# Altium footprint library Cole_.PcbLib: 167 footprints (part 2 of 11)
Each footprint in its own frame and in the unit in brackets; x right, y up, seen from the top. Pads: shape width x height; smd on the part's side, far side on the other; paste and mask are expansions set on the pad; w line width, h text height; cw(c..) or ccw(c..) is an arc to the next point about the centre after c.
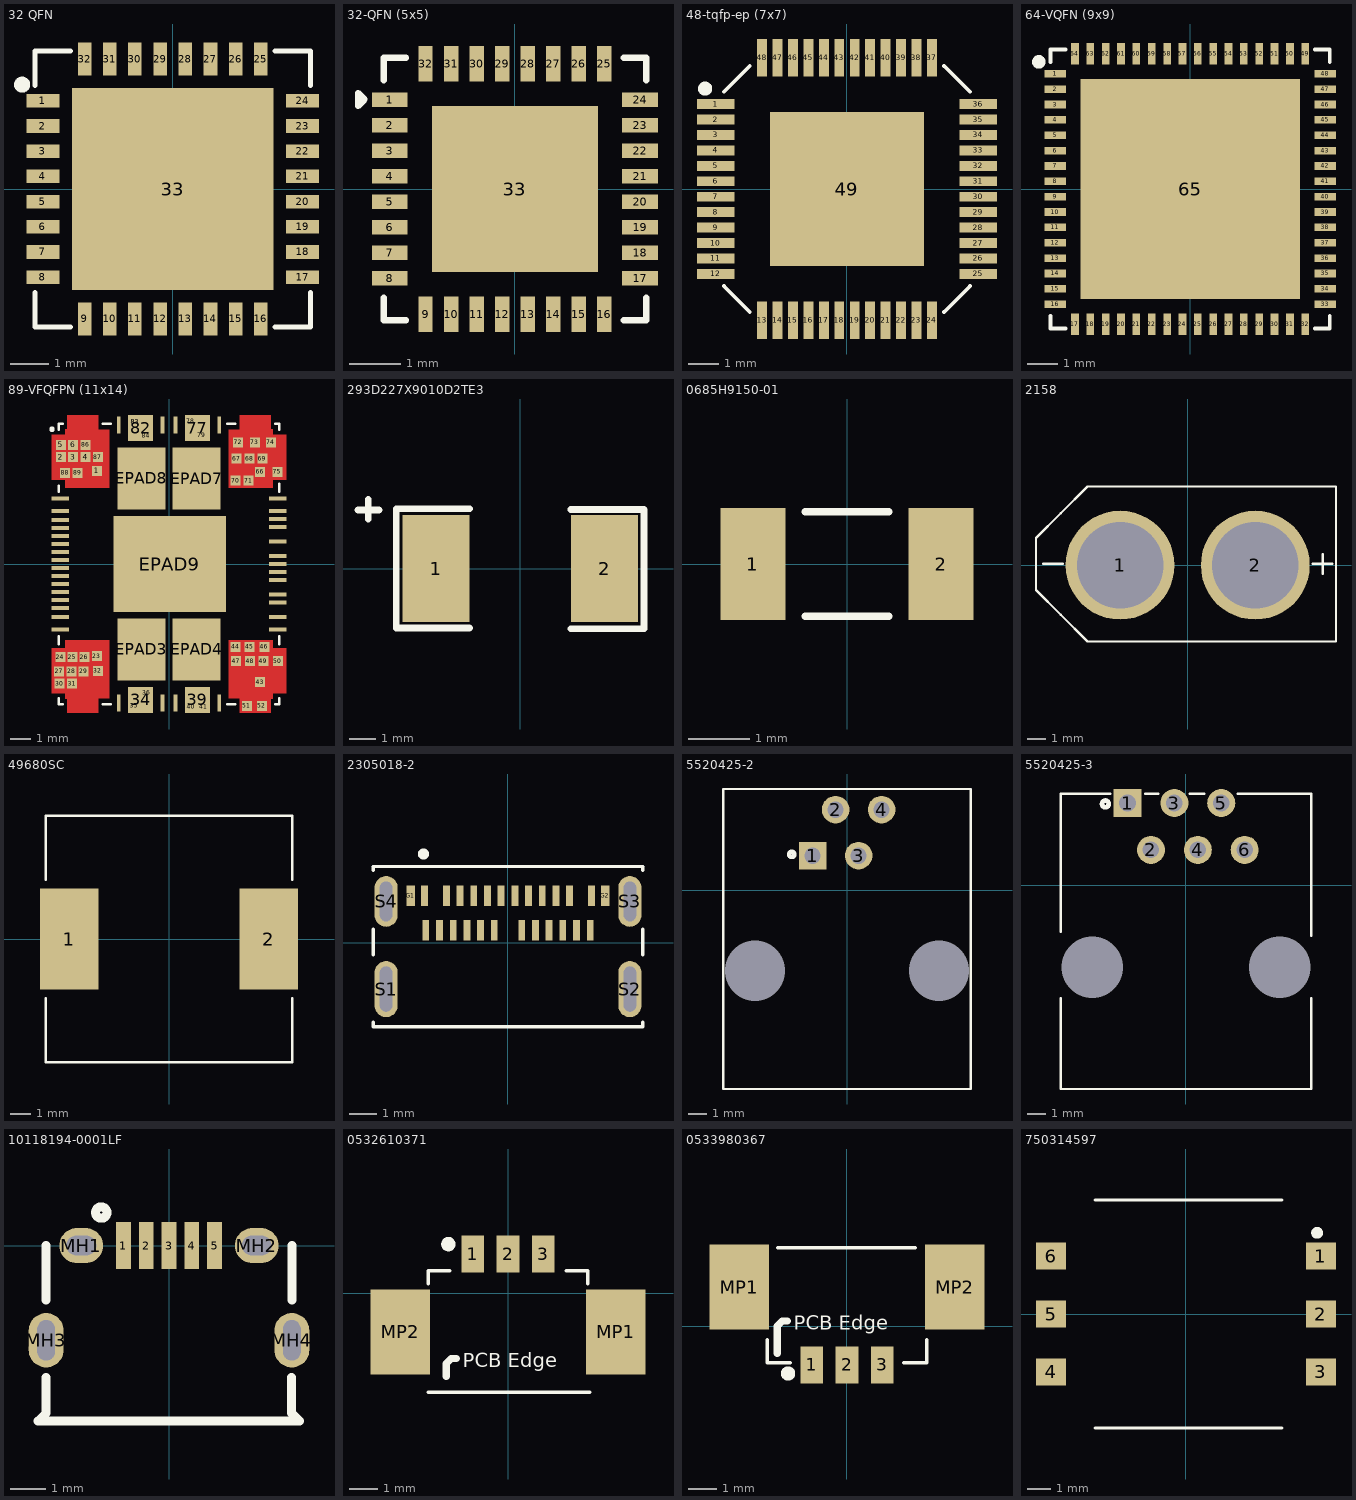
[diagram p1: the footprints below, top view; thin cyan lines are the x and y axes]

## 32 QFN [mm] "32pins, 5x5mm body, 0.5mm pitch QFN package"
pads (33):
  rect 0.85x0.35 smd: 1(-3.35,2.275) 2(-3.35,1.625) 3(-3.35,0.975) 4(-3.35,0.325) 5(-3.35,-0.325) 6(-3.35,-0.975) 7(-3.35,-1.625) 8(-3.35,-2.275) 17(3.35,-2.275) 18(3.35,-1.625) 19(3.35,-0.975) 20(3.35,-0.325) 21(3.35,0.325) 22(3.35,0.975) 23(3.35,1.625) 24(3.35,2.275)
  rect 0.35x0.85 smd: 9(-2.275,-3.35) 10(-1.625,-3.35) 11(-0.975,-3.35) 12(-0.325,-3.35) 13(0.325,-3.35) 14(0.975,-3.35) 15(1.625,-3.35) 16(2.275,-3.35) 25(2.275,3.35) 26(1.625,3.35) 27(0.975,3.35) 28(0.325,3.35) 29(-0.325,3.35) 30(-0.975,3.35) 31(-1.625,3.35) 32(-2.275,3.35)
  rect 5.2x5.2 smd: 33(0,0)
Top Overlay:
  circle w0.254: c-3.886,2.692 r0.08
  lines w0.127: -3.556,-2.667 -3.556,-3.556 -2.642,-3.556 ; -3.556,2.667 -3.556,3.556 -2.642,3.556 ; 2.642,-3.556 3.556,-3.556 3.556,-2.667 ; 2.642,3.556 3.556,3.556 3.556,2.667
3D body "User Library-QFN-32-7x7 - EQ-1.step": height 0.85, standoff 0, extent -3.5,-3.5 3.5,3.5

## 32-QFN (5x5) [mm] "32pins, 5x5mm body, 0.5mm pitch QFN package"
pads (33):
  rect 0.7x0.28 smd: 1(-2.45,1.75) 2(-2.45,1.25) 3(-2.45,0.75) 4(-2.45,0.25) 5(-2.45,-0.25) 6(-2.45,-0.75) 7(-2.45,-1.25) 8(-2.45,-1.75) 17(2.45,-1.75) 18(2.45,-1.25) 19(2.45,-0.75) 20(2.45,-0.25) 21(2.45,0.25) 22(2.45,0.75) 23(2.45,1.25) 24(2.45,1.75)
  rect 0.28x0.7 smd: 9(-1.75,-2.45) 10(-1.25,-2.45) 11(-0.75,-2.45) 12(-0.25,-2.45) 13(0.25,-2.45) 14(0.75,-2.45) 15(1.25,-2.45) 16(1.75,-2.45) 25(1.75,2.45) 26(1.25,2.45) 27(0.75,2.45) 28(0.25,2.45) 29(-0.25,2.45) 30(-0.75,2.45) 31(-1.25,2.45) 32(-1.75,2.45)
  rect 3.254x3.254 smd: 33(0,0)
Top Overlay:
  lines w0.127: -2.565,-2.134 -2.565,-2.565 -2.134,-2.565 ; -2.565,2.134 -2.565,2.565 -2.134,2.565 ; 2.134,-2.565 2.565,-2.565 2.565,-2.134 ; 2.134,2.565 2.565,2.565 2.565,2.134 ; -3.073,1.626 -2.946,1.753 -3.073,1.88 -3.073,1.626
3D body "User Library-QFN-32-5x5 - EQ.STEP": height 0.85, standoff 0, extent -2.5,-2.5 2.5,2.5

## 48-tqfp-ep (7x7) [mm]
pads (49):
  rect 1.22x0.32 smd: 1(-4.25,2.75) 2(-4.25,2.25) 3(-4.25,1.75) 4(-4.25,1.25) 5(-4.25,0.75) 6(-4.25,0.25) 7(-4.25,-0.25) 8(-4.25,-0.75) 9(-4.25,-1.25) 10(-4.25,-1.75) 11(-4.25,-2.25) 12(-4.25,-2.75) 25(4.25,-2.75) 26(4.25,-2.25) 27(4.25,-1.75) 28(4.25,-1.25) 29(4.25,-0.75) 30(4.25,-0.25) 31(4.25,0.25) 32(4.25,0.75) 33(4.25,1.25) 34(4.25,1.75) 35(4.25,2.25) 36(4.25,2.75)
  rect 0.32x1.22 smd: 13(-2.75,-4.25) 14(-2.25,-4.25) 15(-1.75,-4.25) 16(-1.25,-4.25) 17(-0.75,-4.25) 18(-0.25,-4.25) 19(0.25,-4.25) 20(0.75,-4.25) 21(1.25,-4.25) 22(1.75,-4.25) 23(2.25,-4.25) 24(2.75,-4.25) 37(2.75,4.25) 38(2.25,4.25) 39(1.75,4.25) 40(1.25,4.25) 41(0.75,4.25) 42(0.25,4.25) 43(-0.25,4.25) 44(-0.75,4.25) 45(-1.25,4.25) 46(-1.75,4.25) 47(-2.25,4.25) 48(-2.75,4.25)
  rect 5x5 smd: 49(0,0)
Top Overlay:
  circle w0.254: c-4.597,3.251 r0.102
  lines w0.127: -3.988,-3.15 -3.15,-3.988 ; -3.988,3.15 -3.15,3.988 ; 3.15,-3.988 3.988,-3.15 ; 3.15,3.988 3.988,3.15
3D body "User Library-P-LQFP48-7x7-0_50.step": height 1.43, standoff -0.02, extent -4.513,-4.512 4.487,4.488

## 64-VQFN (9x9) [mm]
pads (65):
  rect 0.7x0.25 smd: 1(-4.4,3.75) 2(-4.4,3.25) 3(-4.4,2.75) 4(-4.4,2.25) 5(-4.4,1.75) 6(-4.4,1.25) 7(-4.4,0.75) 8(-4.4,0.25) 9(-4.4,-0.25) 10(-4.4,-0.75) 11(-4.4,-1.25) 12(-4.4,-1.75) 13(-4.4,-2.25) 14(-4.4,-2.75) 15(-4.4,-3.25) 16(-4.4,-3.75) 33(4.4,-3.75) 34(4.4,-3.25) 35(4.4,-2.75) 36(4.4,-2.25) 37(4.4,-1.75) 38(4.4,-1.25) 39(4.4,-0.75) 40(4.4,-0.25) 41(4.4,0.25) 42(4.4,0.75) 43(4.4,1.25) 44(4.4,1.75) 45(4.4,2.25) 46(4.4,2.75) 47(4.4,3.25) 48(4.4,3.75)
  rect 0.25x0.7 smd: 17(-3.75,-4.4) 18(-3.25,-4.4) 19(-2.75,-4.4) 20(-2.25,-4.4) 21(-1.75,-4.4) 22(-1.25,-4.4) 23(-0.75,-4.4) 24(-0.25,-4.4) 25(0.25,-4.4) 26(0.75,-4.4) 27(1.25,-4.4) 28(1.75,-4.4) 29(2.25,-4.4) 30(2.75,-4.4) 31(3.25,-4.4) 32(3.75,-4.4) 49(3.75,4.4) 50(3.25,4.4) 51(2.75,4.4) 52(2.25,4.4) 53(1.75,4.4) 54(1.25,4.4) 55(0.75,4.4) 56(0.25,4.4) 57(-0.25,4.4) 58(-0.75,4.4) 59(-1.25,4.4) 60(-1.75,4.4) 61(-2.25,4.4) 62(-2.75,4.4) 63(-3.25,4.4) 64(-3.75,4.4)
  rect 7.15x7.15 smd: 65(0,0)
Top Overlay:
  circle w0.254: c-4.928,4.14 r0.092
  lines w0.127: -4.547,-4.14 -4.547,-4.547 -4.064,-4.547 ; -4.547,4.14 -4.547,4.547 -4.064,4.547 ; 4.064,-4.547 4.547,-4.547 4.547,-4.14 ; 4.064,4.547 4.547,4.547 4.547,4.14
3D body "User Library-SiLabs QFN64 (9x9).step": height 0.9, standoff 0, extent -4.5,-4.5 4.5,4.5

## 89-VFQFPN (11x14) [mm]
pads (95):
  rect 0.5x0.5 smd paste-1 mask+0: 1(-3.6,4.65) 2(-5.404,5.334) 3(-4.785,5.334) 4(-4.166,5.334) 5(-5.404,5.953) 6(-4.785,5.953) 23(-3.6,-4.6) 24(-5.428,-4.648) 25(-4.826,-4.648) 26(-4.224,-4.648) 27(-5.486,-5.359) 28(-4.859,-5.359) 29(-4.258,-5.359) 30(-5.461,-5.969) 31(-4.834,-5.969) 32(-3.556,-5.334) 35(-1.727,-7.087) 36(-1.1,-6.426) 40(1.1,-7.137) 41(1.727,-7.137) 43(4.55,-5.9) 44(3.327,-4.14) 45(4.031,-4.14) 46(4.759,-4.14) 47(3.353,-4.851) 48(4.056,-4.851) 49(4.708,-4.851) 50(5.437,-4.851) 51(3.886,-7.087) 52(4.64,-7.087) 66(4.55,4.6) 67(3.378,5.258) 68(4.031,5.258) 69(4.658,5.258) 70(3.327,4.166) 71(3.98,4.166) 72(3.454,6.071) 73(4.285,6.071) 74(5.089,6.071) 75(5.41,4.597) 78(1.092,7.137) 79(1.643,6.426) 83(-1.676,7.112) 83(-1.676,7.112) 84(-1.143,6.401) 86(-4.166,5.953) 87(-3.547,5.334) 88(-5.182,4.547) 89(-4.563,4.547)
  rect 0.86x0.19 smd: 7(-5.435,3.27) 8(-5.435,2.65) 9(-5.435,2.2) 10(-5.435,1.8) 11(-5.435,1.4) 12(-5.435,1) 13(-5.435,0.6) 14(-5.435,0.2) 15(-5.435,-0.2) 16(-5.435,-0.6) 17(-5.435,-1) 18(-5.435,-1.4) 19(-5.435,-1.8) 20(-5.435,-2.2) 21(-5.435,-2.65) 22(-5.435,-3.27) 53(5.435,-3.27) 54(5.435,-2.65) 55(5.435,-1.93) 56(5.435,-1.53) 57(5.435,-0.8) 58(5.435,-0.4) 59(5.435,0) 60(5.435,0.4) 61(5.435,1.13) 62(5.435,1.85) 63(5.435,2.25) 64(5.435,2.65) 65(5.435,3.27)
  rect 0.19x0.86 smd: 33(-2.51,-6.935) 37(-0.32,-6.935) 38(0.32,-6.935) 42(2.51,-6.935) 76(2.51,6.935) 80(0.32,6.935) 81(-0.32,6.935) 85(-2.51,6.935)
  rect 1.26x1.3 smd paste-2: 34(-1.42,-6.79) 39(1.42,-6.79) 77(1.42,6.79) 82(-1.42,6.79)
  rect 2.4x3.1 smd paste-3: EPAD3(-1.38,-4.26) EPAD4(1.38,-4.26) EPAD7(1.38,4.26) EPAD8(-1.38,4.27)
  rect 5.6x4.8 smd paste-4: EPAD9(0.04,0)
Top Layer:
  region: -2.99,-6.71 -3.54,-6.71 -3.54,-7.44 -5.07,-7.44 -5.07,-6.72 -5.19,-6.72 -5.19,-6.45 -5.86,-6.45 -5.86,-4.2 -5.18,-4.2 -5.18,-3.81 -2.99,-3.81
  region: 5.07,6.72 5.19,6.72 5.19,6.45 5.86,6.45 5.86,4.2 5.18,4.2 5.18,3.81 2.99,3.81 2.99,6.71 3.54,6.71 3.54,7.44 5.07,7.44
  region: 5.18,-4.2 5.86,-4.2 5.86,-6.45 5.19,-6.45 5.19,-6.72 5.07,-6.72 5.07,-7.44 3.54,-7.44 3.54,-6.71 2.99,-6.71 2.99,-3.81 5.18,-3.81
  region: -3.54,6.71 -2.99,6.71 -2.99,3.81 -5.18,3.81 -5.18,4.2 -5.86,4.2 -5.86,6.45 -5.19,6.45 -5.19,6.72 -5.07,6.72 -5.07,7.44 -3.54,7.44
Top Overlay:
  circle w0.2: c-5.842,6.731 r0.033
  lines w0.127: -5.5,-6.7 -5.5,-7 -5.3,-7 ; -5.5,-4 -5.5,-3.6 ; -5.5,3.6 -5.5,3.9 ; -5.5,6.7 -5.5,7 -5.3,7 ; -3.3,-7 -2.9,-7 ; -3.3,7 -2.9,7 ; 2.9,-7 3.3,-7 ; 2.9,7 3.3,7 ; 5.3,-7 5.5,-7 5.5,-6.7 ; 5.3,7 5.5,7 5.5,6.7 ; 5.5,-4 5.5,-3.6 ; 5.5,3.6 5.5,4
Top Paste:
  drawing of 94 lines, arcs and shapes, not listed
Top Solder:
  region: -5.26,4.14 -5.94,4.14 -5.94,6.55 -5.26,6.55
  region: -2.92,3.75 -5.27,3.75 -5.27,6.78 -2.92,6.78
  region: -3.48,6.68 -5.12,6.68 -5.12,7.49 -3.48,7.49
  region: -5.26,-6.55 -5.94,-6.55 -5.94,-4.14 -5.26,-4.14
  region: -2.92,-6.78 -5.27,-6.78 -5.27,-3.75 -2.92,-3.75
  region: -3.48,-7.49 -5.12,-7.49 -5.12,-6.68 -3.48,-6.68
  region: 5.94,-6.55 5.26,-6.55 5.26,-4.14 5.94,-4.14
  region: 5.27,-6.78 2.92,-6.78 2.92,-3.75 5.27,-3.75
  region: 5.12,-7.49 3.48,-7.49 3.48,-6.68 5.12,-6.68
  region: 5.94,4.14 5.26,4.14 5.26,6.55 5.94,6.55
  region: 5.27,3.75 2.92,3.75 2.92,6.78 5.27,6.78
  region: 5.12,6.68 3.48,6.68 3.48,7.49 5.12,7.49
3D body "User Library-POWERSTEP01.STEP": height 1, standoff 0, extent -5.5,-7.001 5.5,6.999

## 293D227X9010D2TE3 [mm] "220uF 10V, 2917"
pads (2):
  rect 2.5x4 smd: 1(-3.15,0) 2(3.15,0)
Top Overlay:
  lines w0.254: -6.071,2.184 -5.283,2.184 ; -5.69,1.854 -5.69,2.591 ; -1.905,-2.22 -4.643,-2.22 -4.643,2.235 -1.905,2.235 ; 1.885,-2.253 4.623,-2.253 4.623,2.202 1.885,2.202
3D body "D-CASE.stp": height 2.33, standoff -0.59, extent -3.594,-2.21 3.594,2.207

## 0685H9150-01 [mm]
pads (2):
  rect 1.06x1.82 smd: 1(-1.528,0) 2(1.528,0)
Top Overlay:
  lines w0.127: -0.68,-0.849 0.68,-0.849 ; -0.68,0.849 0.68,0.849
3D body "0685H9150-01.STEP": height 0.85, standoff 0, extent -1.6,-0.79 1.6,0.79

## 2158 [mm]
pads (2):
  round 5.8 hole 4.6: 1(-3.6,0) 2(3.6,0)
Top Overlay:
  lines w0.127: -7.698,0.076 -6.657,0.076 ; 6.657,0.076 7.698,0.076 ; 7.188,-0.446 7.188,0.596 ; -8.077,-1.321 -6.756,-2.642 -5.334,-4.064 7.899,-4.064 7.899,4.191 -5.334,4.191 -6.756,2.769 -8.077,1.448 -8.077,-1.321
3D body "User Library-XT60 male.step": height 16.3, standoff -4.9, extent -8.051,-4.013 7.849,4.137

## 49680SC [mm]
pads (2):
  rect 2.9x5 smd mask+0.055: 1(-4.95,0) 2(4.95,0)
Top Overlay:
  lines w0.127: -6.121,-2.946 -6.121,-6.121 6.121,-6.121 6.121,-2.946 ; -6.121,2.946 -6.121,6.121 6.121,6.121 6.121,2.946
3D body "mps_mag_4900s_smt_a.STEP": height 7.5, standoff 0.03, extent -6.05,-6.05 6.05,6.05

## 2305018-2 [mm] "CONN RCP USB3.1 TYPEC 24P SMD RA"
pads (30):
  rect 0.25x0.75 smd: A1(-3.05,1.7) A2(-2.25,1.7) A3(-1.75,1.7) A4(-1.25,1.7) A5(-0.75,1.7) A6(-0.25,1.7) A7(0.25,1.7) A8(0.75,1.7) A9(1.25,1.7) A10(1.75,1.7) A11(2.25,1.7) A12(3.05,1.7) B1(3,0.45) B2(2.5,0.45) B3(2,0.45) B4(1.5,0.45) B5(1,0.45) B6(0.5,0.45) B7(-0.5,0.45) B8(-1,0.45) B9(-1.5,0.45) B10(-2,0.45) B11(-2.5,0.45) B12(-3,0.45)
  rect 0.3x0.75 smd: G1(-3.55,1.7) G2(3.55,1.7)
  oval 0.85x2.05 hole 0.45 slot 1.65 at 90 deg: S1(-4.45,-1.7) S2(4.45,-1.7)
  oval 0.85x1.85 hole 0.45 slot 1.45 at 90 deg: S3(4.45,1.5) S4(-4.45,1.5)
Top Overlay:
  circle w0.2: c-3.085,3.232 r0.1
  lines w0.127: -4.925,-2.906 -4.925,-3.075 4.925,-3.075 4.925,-2.906 ; -4.925,-0.444 -4.925,0.48 ; -4.925,2.634 -4.925,2.775 4.925,2.775 4.925,2.634 ; 4.925,-0.444 4.925,0.48
Mechanical 13:
  lines w0.127: -4.925,2.775 4.925,2.775
3D body "2305018-2--3DModel-STEP-56544.STEP": height 3.53, standoff -0.53, extent -4.919,-5.856 4.919,2.794

## 5520425-2 [mm] "CONN MOD JACK 6P4C VERT UNSHLD"
pads (6):
  rect 1.524x1.524 hole 0.89: 1(-1.9,1.905)
  round 1.524 hole 0.89: 2(-0.63,4.445) 3(0.64,1.905) 4(1.91,4.445)
  round 0 hole 3.33 unplated: MH1(-5.08,-4.445) MH2(5.08,-4.445)
Top Overlay:
  circle w0.254: c-3.048,1.981 r0.144
  lines w0.127: -6.833,-10.973 -6.833,5.588 6.833,5.588 6.833,-10.973 -6.833,-10.973
3D body "c-5520425-2-c-3d.stp": height 16.45, standoff -3.11, extent -6.788,-10.973 6.839,5.537

## 5520425-3 [mm]
pads (8):
  rect 1.52x1.52 hole 0.9: 1(-3.17,4.445)
  round 1.52 hole 0.9: 2(-1.9,1.905) 3(-0.63,4.445) 4(0.64,1.905) 5(1.91,4.445) 6(3.18,1.905)
  round 0 hole 3.33 unplated: MH1(-5.08,-4.445) MH2(5.08,-4.445)
Top Overlay:
  circle w0.254: c-4.369,4.394 r0.183
  lines w0.127: -6.795,-6.145 -6.795,-11.055 6.795,-11.055 6.795,-6.145 ; -6.795,-2.545 -6.795,4.955 -4.1,4.955 ; -2.2,4.955 -1.5,4.955 ; 0.2,4.955 1,4.955 ; 2.8,4.955 6.795,4.955 6.795,-2.745
3D body "5520425-3.stp": height 17, standoff -2.56, extent -6.839,-10.973 6.788,5.537

## 10118194-0001LF [mm]
pads (9):
  rect 0.42x1.35 smd: 1(-1.3,0) 2(-0.65,0) 3(0,0) 4(0.65,0) 5(1.3,0)
  oval 1.25x1 hole 0.55 slot 0.85 at 0 deg: MH1(-2.5,0) MH2(2.5,0)
  oval 1x1.55 hole 0.5 slot 1.15 at 90 deg: MH3(-3.5,-2.7) MH4(3.5,-2.7)
Top Overlay:
  circle w0.254: c-1.93,0.94 r0.163
  lines w0.254: -3.505,-3.765 -3.505,-4.765 -3.505,-4.775 -3.734,-5.004 3.723,-5.004 3.495,-4.775 ; -3.505,-1.549 -3.505,0 ; 3.495,-4.765 3.495,-3.765 ; 3.505,-1.549 3.505,0
3D body "10118194c.stp": height 2.72, standoff -0.55, extent -4.025,-5.385 4.025,0.195

## 0532610371 [mm]
pads (5):
  rect 0.8x1.3 smd: 1(-1.25,1.375) 2(0,1.375) 3(1.25,1.375)
  rect 2.1x3 smd: MP1(3.8,-1.375) MP2(-3.8,-1.375)
Top Overlay:
  circle w0.254: c-2.108,1.727 r0.127
  lines w0.127: -2.819,-3.505 2.896,-3.505 ; -2.819,0.33 -2.819,0.787 -2.057,0.787 ; 2.057,0.787 2.819,0.787 2.819,0.33
  lines w0.254: -2.184,-2.946 -2.184,-2.489 -2.007,-2.311 -1.829,-2.311
  text "PCB Edge" at -1.6,-2.627 h0.5
3D body "asd.STEP": height 3.6, standoff 0.2, extent -4.45,-3.49 4.45,1.71

## 0533980367 [mm]
pads (5):
  rect 0.8x1.3 smd: 1(-1.25,-1.375) 2(0,-1.375) 3(1.25,-1.375)
  rect 2.1x3 smd: MP1(-3.8,1.375) MP2(3.8,1.375)
Top Overlay:
  circle w0.254: c-2.083,-1.676 r0.127
  lines w0.127: -2.819,-0.483 -2.819,-1.295 -2.007,-1.295 ; -2.438,2.769 2.413,2.769 ; 2.007,-1.295 2.819,-1.295 2.819,-0.483
  lines w0.254: -2.464,-0.965 -2.464,0 -2.286,0.178 -2.108,0.178
  text "PCB Edge" at -1.88,-0.138 h0.5
3D body "ase.STEP": height 4.7, standoff 0, extent -4.425,-1.524 4.475,2.676

## 750314597 [mm]
pads (6):
  rect 1.3x1.17 smd: 1(5.83,2.5) 2(5.83,0) 3(5.83,-2.5) 4(-5.83,-2.5) 5(-5.83,0) 6(-5.83,2.5)
Top Overlay:
  circle w0.254: c5.664,3.505 r0.127
  lines w0.127: -3.937,-4.928 4.14,-4.928 ; -3.937,4.928 4.14,4.928
3D body "070-5801 (rev1).STEP": height 8.59, standoff 0, extent -6.35,-4.903 6.35,4.877